# Altium footprint library Module-RF.PcbLib: 19 footprints (part 1 of 2)
Each footprint in its own frame and in the unit in brackets; x right, y up, seen from the top. Pads: shape width x height; smd on the part's side, far side on the other; paste and mask are expansions set on the pad; w line width, h text height; cw(c..) or ccw(c..) is an arc to the next point about the centre after c.
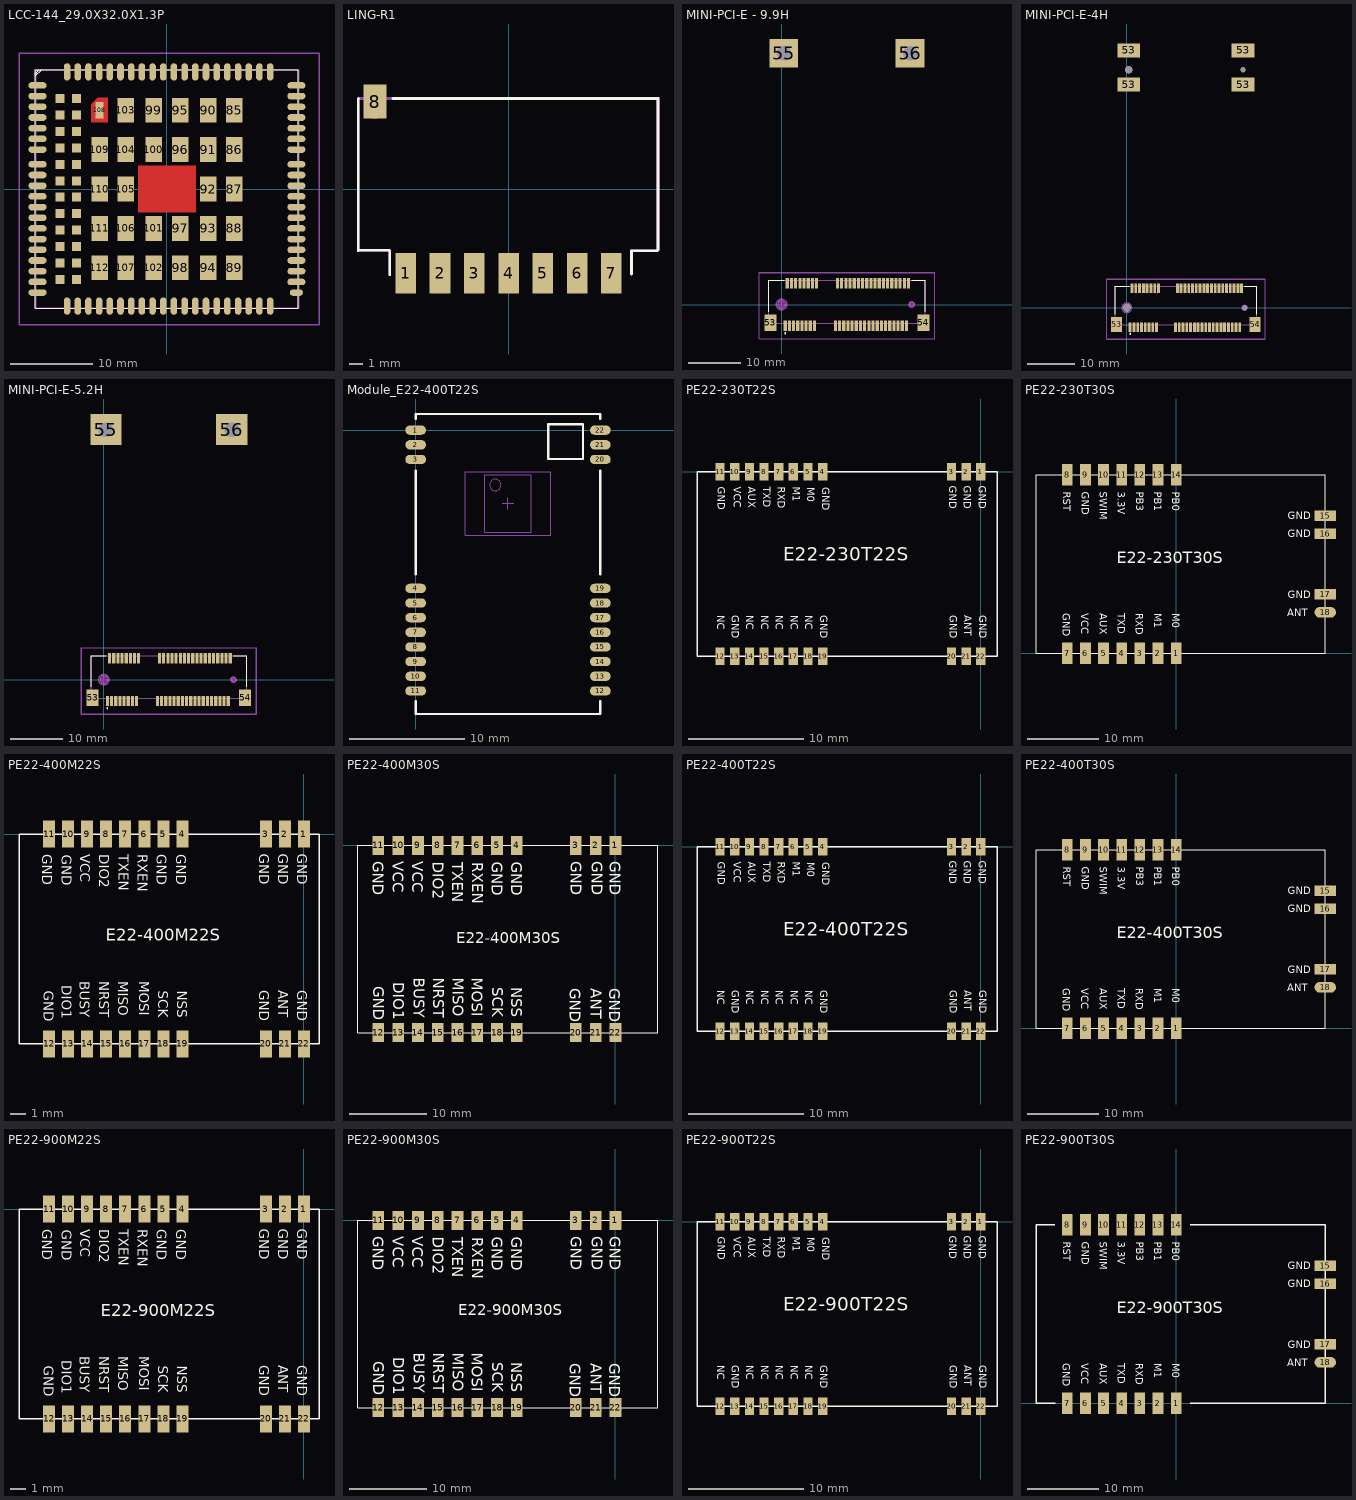
[diagram p0: the footprints below, top view; thin cyan lines are the x and y axes]

## LCC-144_29.0X32.0X1.3P [mm] "EC20 4G模块邮票孔封装"
pads (132):
  oval 2.2x0.8 smd mask+0.05: 1(-15.75,12.6) 2(-15.75,11.3) 3(-15.75,10) 4(-15.75,8.7) 5(-15.75,7.4) 6(-15.75,6.1) 7(-15.75,4.8) 8(-15.75,0.4) 9(-15.75,-0.9) 10(-15.75,-2.2) 11(-15.75,-3.5) 12(-15.75,-4.8) 13(-15.75,-6.1) 14(-15.75,-7.4) 15(-15.75,-8.7) 16(-15.75,-10) 17(-15.75,-11.3) 18(-15.75,-12.6) 38(15.75,-11.3) 39(15.75,-10) 40(15.75,-8.7) 41(15.75,-7.4) 42(15.75,-6.1) 43(15.75,-4.8) 44(15.75,-3.5) 45(15.75,-2.2) 46(15.75,-0.9) 47(15.75,0.4) 48(15.75,4.8) 49(15.75,6.1) 50(15.75,7.4) 51(15.75,8.7) 52(15.75,10) 53(15.75,11.3) 54(15.75,12.6) 141(-15.75,3) 142(-15.75,1.7) 143(15.75,1.7) 144(15.75,3)
  oval 0.8x2.1 smd mask+0.05: 19(-9.55,-14.25) 20(-8.25,-14.25) 21(-6.95,-14.25) 22(-5.65,-14.25) 23(-4.35,-14.25) 24(-3.05,-14.25) 25(-1.75,-14.25) 26(-0.45,-14.25) 27(0.85,-14.25) 28(2.15,-14.25) 29(3.45,-14.25) 30(4.75,-14.25) 31(6.05,-14.25) 32(7.35,-14.25) 33(8.65,-14.25) 34(9.95,-14.25) 35(11.25,-14.25) 36(12.55,-14.25) 55(12.55,14.25) 56(11.25,14.25) 57(9.95,14.25) 58(8.65,14.25) 59(7.35,14.25) 60(6.05,14.25) 61(4.75,14.25) 62(3.45,14.25) 63(2.15,14.25) 64(0.85,14.25) 65(-0.45,14.25) 66(-1.75,14.25) 67(-3.05,14.25) 68(-4.35,14.25) 69(-5.65,14.25) 70(-6.95,14.25) 71(-8.25,14.25) 72(-9.55,14.25) 113(-10.85,14.25) 114(-12.15,14.25) 115(-10.85,-14.25) 116(-12.15,-14.25)
  oval 1.6x0.8 smd mask+0.05: 37(15.75,-12.6)
  rect 2x3 smd mask+0.05: 85(8.2,9.6) 86(8.2,4.8) 87(8.2,0) 88(8.2,-4.8) 89(8.2,-9.6) 90(5,9.6) 91(5,4.8) 92(5,0) 93(5,-4.8) 94(5,-9.6) 95(1.6,9.6) 96(1.6,4.8) 97(1.6,-4.8) 98(1.6,-9.6) 99(-1.6,9.6) 100(-1.6,4.8) 101(-1.6,-4.8) 102(-1.6,-9.6) 103(-5,9.6) 104(-5,4.8) 105(-5,0) 106(-5,-4.8) 107(-5,-9.6) 109(-8.2,4.8) 110(-8.2,0) 111(-8.2,-4.8) 112(-8.2,-9.6)
  rect 1x2 smd: 108(-8.2,9.6)
  rect 1.1x1.1 smd mask+0.05: 117(-11,11) 118(-11,9) 119(-11,7) 120(-11,5) 121(-11,3) 122(-11,1) 123(-11,-1) 124(-11,-3) 125(-11,-5) 126(-11,-7) 127(-11,-9) 128(-11,-11) 129(-13,11) 130(-13,9) 131(-13,7) 132(-13,5) 133(-13,3) 134(-13,1) 135(-13,-1) 136(-13,-3) 137(-13,-5) 138(-13,-7) 139(-13,-9) 140(-13,-11)
Top Layer:
  pour cut-out: 3.5,2.8 -3.5,2.8 -3.5,-2.8 3.5,-2.8
  region: -9.2,10.3 -8.4,11.1 -7.2,11.1 -7.2,8.1 -9.2,8.1
Top Overlay:
  lines w0.102: -16,13.75 -15.25,14.5 ; -16,14.5 -16,14.05 -15.55,14.5 -16,14.5 ; -16,14.5 -16,-14.5 16,-14.5 16,14.5 -16,14.5
Top Paste:
  region: -9.2,10.3 -8.4,11.1 -7.2,11.1 -7.2,8.1 -9.2,8.1
Top Solder:
  region: -9.25,8.05 -7.15,8.05 -7.15,11.15 -8.45,11.15 -9.25,10.35
Top Component Outline:
  lines w0.2: -16,-14.5 -16,14.5 16,14.5 16,-14.5 -16,-14.5
Top Value:
  text "'.Comment'" at -5.266,-1.08 h4
Top Designator:
  text "'.Designator'" at -11.5,-1.5 h4
Top Courtyard:
  lines w0.152: -18,-16.5 18.5,-16.5 18.5,16.5 -18,16.5 -18,-16.5
  lines w0.2: -1.5,0 1.5,0 ; 0,-1.5 0,1.5
Top Assembly (Mech20):
  lines w0.2: -16,-14.5 -16,14.5 16,14.5 16,-14.5 -16,-14.5
3D body "EC20_R2.1_assy_3D_20171216.stp": height 2.4, standoff 0, extent -16,-14.5 16,14.5

## LING-R1 [mm] "蜂鸟无线模块 灵-R1"
pads (8):
  rect 1.524x3 smd paste+0 mask+0.051: 1(-7.62,-6.225) 2(-5.08,-6.225) 3(-2.54,-6.225) 4(0,-6.225) 5(2.54,-6.225) 6(5.08,-6.225) 7(7.62,-6.225)
  rect 1.7x2.5 smd paste+0 mask+0.051: 8(-9.906,6.475)
Top Layer:
  lines w0.254: -10.369,5.779 cw(c-9.919,5.779) -9.469,5.779 ; -10.369,5.779 ccw(c-9.919,5.779) -9.469,5.779 ; -10.369,5.779 cw(c-9.919,5.779) -9.469,5.779 ; -10.369,5.779 ccw(c-9.919,5.779) -9.469,5.779 ; -10.396,5.779 cw(c-9.919,5.779) -9.442,5.779 cw(c-9.919,5.779) -10.396,5.779
Top Overlay:
  lines w0.2: -11.112,6.699 -11.132,6.68 -11.132,-4.559 -11.112,-4.54 -8.844,-4.54 -8.8,-4.585 -8.8,-6.338 ; -8.559,6.699 11.049,6.699 11.068,6.718 11.068,-4.521 11.005,-4.585 9.1,-4.585 9.1,-6.3
Top Value:
  text "'.Comment'" at -5.8,-0.581 h2.54
Top Designator:
  text "'.Designator'" at -7.1,-0.456 h2.54
Top Assembly (Mech20):
  lines w0.2: -8.8,-6.338 -8.8,-4.585 -8.844,-4.54 -11.112,-4.54 -11.132,-4.559 -11.132,6.68 -11.112,6.699 11.049,6.699 11.068,6.718 11.068,-4.521 11.005,-4.585 9.1,-4.585 9.1,-6.3

## MINI-PCI-E - 9.9H [mm] "MINI PCI-e 52P贴片插座，间距0.8mm 高度9mm"
pads (56):
  rect 0.6x2 smd: 1(0.7,-4.1) 2(1.1,4.1) 3(1.5,-4.1) 4(1.9,4.1) 5(2.3,-4.1) 6(2.7,4.1) 7(3.1,-4.1) 8(3.5,4.1) 9(3.9,-4.1) 10(4.3,4.1) 11(4.7,-4.1) 12(5.1,4.1) 13(5.5,-4.1) 14(5.9,4.1) 15(6.3,-4.1) 16(6.7,4.1) 17(10.3,-4.1) 18(10.7,4.1) 19(11.1,-4.1) 20(11.5,4.1) 21(11.9,-4.1) 22(12.3,4.1) 23(12.7,-4.1) 24(13.1,4.1) 25(13.5,-4.1) 26(13.9,4.1) 27(14.3,-4.1) 28(14.7,4.1) 29(15.1,-4.1) 30(15.5,4.1) 31(15.9,-4.1) 32(16.3,4.1) 33(16.7,-4.1) 34(17.1,4.1) 35(17.5,-4.1) 36(17.9,4.1) 37(18.3,-4.1) 38(18.7,4.1) 39(19.1,-4.1) 40(19.5,4.1) 41(19.9,-4.1) 42(20.3,4.1) 43(20.7,-4.1) 44(21.1,4.1) 45(21.5,-4.1) 46(21.9,4.1) 47(22.3,-4.1) 48(22.7,4.1) 49(23.1,-4.1) 50(23.5,4.1) 51(23.9,-4.1) 52(24.3,4.1)
  rect 2.3x3.2 smd: 53(-2.15,-3.5) 54(27.15,-3.5)
  rect 5.5x5.5 hole 2.8: 55(0.4,48.05) 56(24.6,48.05)
Top Overlay:
  lines w0.1: -2.45,-1.4 -2.45,4.6 0.5,4.6 ; 24.9,4.6 27.45,4.6 27.45,-1.4
  lines w0.2: 0.6,-5.5 cw(c0.7,-5.5) 0.8,-5.5 cw(c0.7,-5.5) 0.6,-5.5
Keep-Out Layer:
  board cut-out: 24.55,0 24.55,-0.09 24.619,-0.255 24.745,-0.381 24.91,-0.45 25,-0.45 25.09,-0.45 25.255,-0.381 25.381,-0.255 25.45,-0.09 25.45,0 25.45,0.09 25.381,0.255 25.255,0.381 25.09,0.45 25,0.45 24.91,0.45 24.745,0.381 24.619,0.255 24.55,0.09
  board cut-out: 0,-0.7 -0.069,-0.7 -0.204,-0.673 -0.332,-0.62 -0.446,-0.544 -0.544,-0.446 -0.62,-0.332 -0.673,-0.204 -0.7,-0.069 -0.7,0 -0.7,0.069 -0.673,0.204 -0.62,0.332 -0.544,0.446 -0.446,0.544 -0.332,0.62 -0.204,0.673 -0.069,0.7 0,0.7 0.069,0.7 0.204,0.673 0.332,0.62 0.446,0.544 0.544,0.446 0.62,0.332 0.673,0.204 0.7,0.069 0.7,0 0.7,-0.069 0.673,-0.204 0.62,-0.332 0.544,-0.446 0.446,-0.544 0.332,-0.62 0.204,-0.673 0.069,-0.7
Board Outline:
  circle w0.1: c25,0 r0.45
  circle w0.1: c0,0 r0.7
Body Extra:
  lines w0.2: -2.45,-3.6 27.45,-3.6 27.45,4.6 -2.45,4.6 -2.45,-3.6
Bottom Courtyard:
  lines w0.1: -4.3,-6.6 29.3,-6.6 29.3,6.1 -4.3,6.1 -4.3,-6.6
Mechanical 29:
  circle w0.3: c24.892,0 r0.5
  circle w0.3: c0,0 r1
  lines w0.1: -4.25,-6.525 -4.25,6.175 29.35,6.175 29.35,-6.525 -4.25,-6.525
  text "'.Designator'" at 6.604,-0.508 h1.02
3D body "mini PEI-E 9.9h.stp": height 9.92, standoff -0.63, extent -2.5,-4.55 27.5,4.67

## MINI-PCI-E-4H [mm] "MINI PCI-e 52P贴片插座"
pads (62):
  rect 0.6x2 smd: 1(0.7,-4.1) 2(1.1,4.1) 3(1.5,-4.1) 4(1.9,4.1) 5(2.3,-4.1) 6(2.7,4.1) 7(3.1,-4.1) 8(3.5,4.1) 9(3.9,-4.1) 10(4.3,4.1) 11(4.7,-4.1) 12(5.1,4.1) 13(5.5,-4.1) 14(5.9,4.1) 15(6.3,-4.1) 16(6.7,4.1) 17(10.3,-4.1) 18(10.7,4.1) 19(11.1,-4.1) 20(11.5,4.1) 21(11.9,-4.1) 22(12.3,4.1) 23(12.7,-4.1) 24(13.1,4.1) 25(13.5,-4.1) 26(13.9,4.1) 27(14.3,-4.1) 28(14.7,4.1) 29(15.1,-4.1) 30(15.5,4.1) 31(15.9,-4.1) 32(16.3,4.1) 33(16.7,-4.1) 34(17.1,4.1) 35(17.5,-4.1) 36(17.9,4.1) 37(18.3,-4.1) 38(18.7,4.1) 39(19.1,-4.1) 40(19.5,4.1) 41(19.9,-4.1) 42(20.3,4.1) 43(20.7,-4.1) 44(21.1,4.1) 45(21.5,-4.1) 46(21.9,4.1) 47(22.3,-4.1) 48(22.7,4.1) 49(23.1,-4.1) 50(23.5,4.1) 51(23.9,-4.1) 52(24.3,4.1)
  rect 2.3x3.2 smd: 53(-2.15,-3.5) 54(27.15,-3.5)
  rect 4.8x3 smd: 53(0.4,47.25) 53(0.4,54.5) 53(24.6,47.25) 53(24.6,54.5)
  round 1.524 hole 1.6: 55(0,0) 55(0.4,50.4)
  round 1 hole 1.1: 56(24.6,50.4) 56(25,0)
Top Overlay:
  lines w0.1: -2.45,-1.4 -2.45,4.6 0.5,4.6 ; 24.9,4.6 27.45,4.6 27.45,-1.4
  lines w0.2: 0.6,-5.5 ccw(c0.7,-5.5) 0.8,-5.5 ccw(c0.7,-5.5) 0.6,-5.5
Keep-Out Layer:
  board cut-out: 0,-0.7 -0.069,-0.7 -0.204,-0.673 -0.332,-0.62 -0.446,-0.544 -0.544,-0.446 -0.62,-0.332 -0.673,-0.204 -0.7,-0.069 -0.7,0 -0.7,0.069 -0.673,0.204 -0.62,0.332 -0.544,0.446 -0.446,0.544 -0.332,0.62 -0.204,0.673 -0.069,0.7 0,0.7 0.069,0.7 0.204,0.673 0.332,0.62 0.446,0.544 0.544,0.446 0.62,0.332 0.673,0.204 0.7,0.069 0.7,0 0.7,-0.069 0.673,-0.204 0.62,-0.332 0.544,-0.446 0.446,-0.544 0.332,-0.62 0.204,-0.673 0.069,-0.7
Board Outline:
  circle w0.1: c0,0 r0.7
Body Extra:
  lines w0.2: -2.45,-3.6 -2.45,4.6 27.45,4.6 27.45,-3.6 -2.45,-3.6
Bottom Courtyard:
  lines w0.1: -4.3,-6.6 -4.3,6.1 29.3,6.1 29.3,-6.6 -4.3,-6.6
Mechanical 29:
  circle w0.3: c0,0 r1
  circle w0.3: c24.892,0 r0.5
  lines w0.1: -4.25,-6.525 29.35,-6.525 29.35,6.175 -4.25,6.175 -4.25,-6.525
  text "'.Designator'" at 6.604,-0.508 h1.02
3D body "mini PIC-E 4H type I GF.stp": height 4, standoff -0.65, extent -2.45,-4.555 27.45,4.535
3D body "EC20 Minipcie_3DFile_20170727.stp": height 5.05, standoff 0.1, extent -2.5,0 27.5,50.95
3D body "mini-pci-e-latch.stp": height 4.85, standoff -0.7, extent -1.725,46.14 26.725,55.5

## MINI-PCI-E-5.2H [mm] "MINI PCI-e 52P贴片插座，间距0.8mm 高度9mm"
pads (56):
  rect 0.6x2 smd: 1(0.7,-4.1) 2(1.1,4.1) 3(1.5,-4.1) 4(1.9,4.1) 5(2.3,-4.1) 6(2.7,4.1) 7(3.1,-4.1) 8(3.5,4.1) 9(3.9,-4.1) 10(4.3,4.1) 11(4.7,-4.1) 12(5.1,4.1) 13(5.5,-4.1) 14(5.9,4.1) 15(6.3,-4.1) 16(6.7,4.1) 17(10.3,-4.1) 18(10.7,4.1) 19(11.1,-4.1) 20(11.5,4.1) 21(11.9,-4.1) 22(12.3,4.1) 23(12.7,-4.1) 24(13.1,4.1) 25(13.5,-4.1) 26(13.9,4.1) 27(14.3,-4.1) 28(14.7,4.1) 29(15.1,-4.1) 30(15.5,4.1) 31(15.9,-4.1) 32(16.3,4.1) 33(16.7,-4.1) 34(17.1,4.1) 35(17.5,-4.1) 36(17.9,4.1) 37(18.3,-4.1) 38(18.7,4.1) 39(19.1,-4.1) 40(19.5,4.1) 41(19.9,-4.1) 42(20.3,4.1) 43(20.7,-4.1) 44(21.1,4.1) 45(21.5,-4.1) 46(21.9,4.1) 47(22.3,-4.1) 48(22.7,4.1) 49(23.1,-4.1) 50(23.5,4.1) 51(23.9,-4.1) 52(24.3,4.1)
  rect 2.3x3.2 smd: 53(-2.15,-3.5) 54(27.15,-3.5)
  rect 6x6 hole 2.8: 55(0.4,48.05) 56(24.6,48.05)
Top Overlay:
  lines w0.1: -2.45,-1.4 -2.45,4.6 0.5,4.6 ; 24.9,4.6 27.45,4.6 27.45,-1.4
  lines w0.2: 0.6,-5.5 cw(c0.7,-5.5) 0.8,-5.5 cw(c0.7,-5.5) 0.6,-5.5
Keep-Out Layer:
  board cut-out: 24.55,0 24.55,-0.09 24.619,-0.255 24.745,-0.381 24.91,-0.45 25,-0.45 25.09,-0.45 25.255,-0.381 25.381,-0.255 25.45,-0.09 25.45,0 25.45,0.09 25.381,0.255 25.255,0.381 25.09,0.45 25,0.45 24.91,0.45 24.745,0.381 24.619,0.255 24.55,0.09
  board cut-out: 0,-0.7 -0.069,-0.7 -0.204,-0.673 -0.332,-0.62 -0.446,-0.544 -0.544,-0.446 -0.62,-0.332 -0.673,-0.204 -0.7,-0.069 -0.7,0 -0.7,0.069 -0.673,0.204 -0.62,0.332 -0.544,0.446 -0.446,0.544 -0.332,0.62 -0.204,0.673 -0.069,0.7 0,0.7 0.069,0.7 0.204,0.673 0.332,0.62 0.446,0.544 0.544,0.446 0.62,0.332 0.673,0.204 0.7,0.069 0.7,0 0.7,-0.069 0.673,-0.204 0.62,-0.332 0.544,-0.446 0.446,-0.544 0.332,-0.62 0.204,-0.673 0.069,-0.7
Board Outline:
  circle w0.1: c25,0 r0.45
  circle w0.1: c0,0 r0.7
Body Extra:
  lines w0.2: -2.45,-3.6 27.45,-3.6 27.45,4.6 -2.45,4.6 -2.45,-3.6
Bottom Courtyard:
  lines w0.1: -4.3,-6.6 29.3,-6.6 29.3,6.1 -4.3,6.1 -4.3,-6.6
Mechanical 29:
  circle w0.3: c24.892,0 r0.5
  circle w0.3: c0,0 r1
  lines w0.1: -4.25,-6.525 -4.25,6.175 29.35,6.175 29.35,-6.525 -4.25,-6.525
  text "'.Designator'" at 6.604,-0.508 h1.02
3D body "mini PCI-E 5.6H.stp": height 5.77, standoff -0.48, extent -2.45,-4.555 27.45,4.525

## Module_E22-400T22S [mm]
height 1.7
pads (22):
  oval 1.8x0.8 smd: 1(0,0) 2(0,-1.27) 3(0,-2.54) 4(0,-13.71) 5(0,-14.98) 6(0,-16.25) 7(0,-17.52) 8(0,-18.79) 9(0,-20.06) 10(0,-21.33) 11(0,-22.6) 12(16,-22.6) 13(16,-21.33) 14(16,-20.06) 15(16,-18.79) 16(16,-17.52) 17(16,-16.25) 18(16,-14.98) 19(16,-13.71) 20(16,-2.54) 21(16,-1.27) 22(16,0)
Top Overlay:
  lines w0.2: 0,-23.5 0,-24.6 16,-24.6 16,-23.5 ; 0,-12.5 0,-3.5 ; 0,1 0,1.4 16,1.4 16,1 ; 16,-12.5 16,-3.5 ; 11.5,-2.5 14.5,-2.5 14.5,0.5 11.5,0.5 11.5,-2.5
Top Courtyard:
  lines w0.05: 4.3,-9.1 11.7,-9.1 11.7,-3.6 4.3,-3.6 4.3,-9.1
  lines w0.1: 7.5,-6.35 8.5,-6.35 ; 8,-6.85 8,-5.85
Top Assembly (Mech20):
  circle w0.1: c6.9,-4.75 r0.5
  lines w0.1: 6,-8.85 10,-8.85 10,-3.85 6,-3.85 6,-8.85
3D body "User Library-E18-MS1PA1-IPX.STEP": height 2.4, standoff -0.01, extent -0.11,-22.81 16.11,-0.2

## PE22-230T22S [mm] "26mm**16mm*3.23mm-S"
pads (22):
  rect 0.8x1.5 smd: 1(0,0) 2(-1.27,0) 3(-2.54,0) 4(-13.71,0) 5(-14.98,0) 6(-16.25,0) 7(-17.52,0) 8(-18.79,0) 9(-20.06,0) 10(-21.33,0) 11(-22.6,0) 12(-22.6,-16) 13(-21.33,-16) 14(-20.06,-16) 15(-18.79,-16) 16(-17.52,-16) 17(-16.25,-16) 18(-14.98,-16) 19(-13.71,-16) 20(-2.54,-16) 21(-1.27,-16) 22(0,-16)
Top Overlay:
  lines w0.127: -24.6,-16 -24.6,0 1.4,0 1.4,-16 -24.6,-16
  text "GND" at -0.408,-1.224 h1.1
  text "E22-230T22S" at -17.107,-8.126 h2
  text "M0" at -15.257,-1.351 h1.1
  text "M1" at -16.536,-1.301 h1.1
  text "RXD" at -17.814,-1.301 h1.1
  text "TXD" at -19.093,-1.301 h1.1
  text "AUX" at -20.372,-1.301 h1.1
  text "VCC" at -21.651,-1.301 h1.1
  text "GND" at -23.01,-1.301 h1.1
  text "GND" at -13.97,-1.351 h1.1
  text "NC" at -23.06,-12.441 h1.1
  text "GND" at -21.811,-12.441 h1.1
  text "NC" at -20.532,-12.441 h1.1
  text "NC" at -19.253,-12.441 h1.1
  text "NC" at -17.974,-12.441 h1.1
  text "NC" at -16.696,-12.441 h1.1
  text "NC" at -15.417,-12.441 h1.1
  text "GND" at -14.138,-12.441 h1.1
  text "GND" at -0.358,-12.441 h1.1
  text "ANT" at -1.637,-12.441 h1.1
  text "GND" at -2.916,-12.441 h1.1
  text "GND" at -2.966,-1.224 h1.1
  text "GND" at -1.687,-1.224 h1.1
3D body "E18-MS1PA1-PCB.step": height 2.71, standoff -0.01, extent -25.004,-16 2.004,0.009

## PE22-230T30S [mm] "40.5mm*25mm*3.80mm-S"
pads (18):
  rect 1.5x3 smd: 1(0,0) 2(-2.54,0) 3(-5.08,0) 4(-7.62,0) 5(-10.16,0) 6(-12.7,0) 7(-15.24,0) 8(-15.24,25) 9(-12.7,25) 10(-10.16,25) 11(-7.62,25) 12(-5.08,25) 13(-2.54,25) 14(0,25)
  rect 3x1.5 smd: 15(20.88,19.27) 16(20.88,16.73) 17(20.88,8.27)
  oval 3x1.5 smd: 18(20.88,5.73)
Top Overlay:
  lines w0.127: -19.62,0 -19.62,25 20.88,25 20.88,0 -19.62,0
  text "E22-230T30S" at -8.317,12.065 h2.8
  text "GND" at 15.602,7.72 h1
  text "ANT" at 15.554,5.17 h1
  text "M0" at -0.577,5.575 h1
  text "M1" at -3.087,5.575 h1
  text "RXD" at -5.637,5.575 h1
  text "TXD" at -8.167,5.575 h1
  text "AUX" at -10.707,5.575 h1
  text "VCC" at -13.257,5.575 h1
  text "GND" at -15.847,5.575 h1
  text "RST" at -15.827,22.592 h1
  text "GND" at -13.237,22.592 h1
  text "3.3V" at -8.147,22.592 h1
  text "PB3" at -5.617,22.592 h1
  text "PB1" at -3.067,22.592 h1
  text "PB0" at -0.557,22.592 h1
  text "GND" at 15.602,16.22 h1
  text "GND" at 15.602,18.73 h1
  text "SWIM" at -10.73,22.606 h1

## PE22-400M22S [mm] "20mm*14mm*2.8mm-S"
pads (22):
  rect 0.8x1.8 smd: 1(0,0) 2(-1.27,0) 3(-2.54,0) 4(-8.11,0) 5(-9.38,0) 6(-10.65,0) 7(-11.92,0) 8(-13.19,0) 9(-14.46,0) 10(-15.73,0) 11(-17,0) 12(-17,-14) 13(-15.73,-14) 14(-14.46,-14) 15(-13.19,-14) 16(-11.92,-14) 17(-10.65,-14) 18(-9.38,-14) 19(-8.11,-14) 20(-2.54,-14) 21(-1.27,-14) 22(0,-14)
Top Overlay:
  lines w0.1: -19,-14 1,-14 1,0 -19,0 -19,-14
  text "E22-400M22S" at -13.208,-7.112 h0.8
  text "NSS" at -8.459,-10.444 h0.65
  text "SCK" at -9.729,-10.444 h0.65
  text "MOSI" at -10.999,-9.809 h0.65
  text "MISO" at -12.396,-9.809 h0.65
  text "NRST" at -13.666,-9.809 h0.65
  text "BUSY" at -14.936,-9.809 h0.65
  text "DIO1" at -16.14,-10.097 h0.65
  text "GND" at -17.349,-10.444 h0.65
  text "GND" at -2.996,-10.428 h0.65
  text "ANT" at -1.717,-10.428 h0.65
  text "GND" at -0.438,-10.428 h0.65
  text "GND" at -0.438,-1.323 h0.65
  text "GND" at -1.717,-1.323 h0.65
  text "GND" at -2.996,-1.323 h0.65
  text "GND" at -17.45,-1.353 h0.65
  text "GND" at -16.14,-1.373 h0.65
  text "VCC" at -14.922,-1.353 h0.65
  text "DIO2" at -13.643,-1.353 h0.65
  text "TXEN" at -12.364,-1.353 h0.65
  text "RXEN" at -11.086,-1.353 h0.65
  text "GND" at -9.807,-1.353 h0.65
  text "GND" at -8.528,-1.353 h0.65

## PE22-400M30S [mm] "38.5mm*24mm*3.8mm-S"
pads (22):
  rect 1.5x2.5 smd: 1(0,0) 2(-2.54,0) 3(-5.08,0) 4(-12.65,0) 5(-15.19,0) 6(-17.73,0) 7(-20.27,0) 8(-22.81,0) 9(-25.35,0) 10(-27.89,0) 11(-30.43,0) 12(-30.43,-24) 13(-27.89,-24) 14(-25.35,-24) 15(-22.81,-24) 16(-20.27,-24) 17(-17.73,-24) 18(-15.19,-24) 19(-12.65,-24) 20(-5.08,-24) 21(-2.54,-24) 22(0,-24)
Top Overlay:
  lines w0.1: -33.04,-24 -33.04,0 5.46,0 5.46,-24 -33.04,-24
  text "NSS" at -13.351,-18.17 h1.4
  text "SCK" at -15.816,-18.17 h1.4
  text "MOSI" at -18.416,-16.979 h1.4
  text "MISO" at -20.881,-16.979 h1.4
  text "NRST" at -23.406,-16.979 h1.4
  text "BUSY" at -25.871,-16.979 h1.4
  text "DIO1" at -28.532,-17.552 h1.4
  text "GND" at -31.079,-18.064 h1.4
  text "GND" at -5.844,-18.291 h1.4
  text "ANT" at -3.202,-18.291 h1.4
  text "GND" at -0.775,-18.291 h1.4
  text "GND" at -0.748,-1.991 h1.4
  text "GND" at -3.07,-1.991 h1.4
  text "GND" at -5.743,-1.991 h1.4
  text "GND" at -31.143,-2.051 h1.4
  text "VCC" at -28.61,-2.051 h1.4
  text "VCC" at -26.076,-2.051 h1.4
  text "DIO2" at -23.438,-2.117 h1.4
  text "TXEN" at -20.935,-2.169 h1.4
  text "RXEN" at -18.402,-2.169 h1.4
  text "GND" at -15.899,-2.096 h1.4
  text "GND" at -13.366,-2.096 h1.4
  text "E22-400M30S" at -20.447,-12.573 h1.4

## PE22-400T22S [mm] "26mm**16mm*3.23mm-S"
pads (22):
  rect 0.8x1.5 smd: 1(0,0) 2(-1.27,0) 3(-2.54,0) 4(-13.71,0) 5(-14.98,0) 6(-16.25,0) 7(-17.52,0) 8(-18.79,0) 9(-20.06,0) 10(-21.33,0) 11(-22.6,0) 12(-22.6,-16) 13(-21.33,-16) 14(-20.06,-16) 15(-18.79,-16) 16(-17.52,-16) 17(-16.25,-16) 18(-14.98,-16) 19(-13.71,-16) 20(-2.54,-16) 21(-1.27,-16) 22(0,-16)
Top Overlay:
  lines w0.127: -24.6,-16 1.4,-16 1.4,0 -24.6,0 -24.6,-16
  text "GND" at -1.687,-1.224 h1.1
  text "GND" at -2.966,-1.224 h1.1
  text "GND" at -2.916,-12.441 h1.1
  text "ANT" at -1.637,-12.441 h1.1
  text "GND" at -0.358,-12.441 h1.1
  text "GND" at -14.138,-12.441 h1.1
  text "NC" at -15.417,-12.441 h1.1
  text "NC" at -16.696,-12.441 h1.1
  text "NC" at -17.974,-12.441 h1.1
  text "NC" at -19.253,-12.441 h1.1
  text "NC" at -20.532,-12.441 h1.1
  text "GND" at -21.811,-12.441 h1.1
  text "NC" at -23.06,-12.441 h1.1
  text "GND" at -13.97,-1.351 h1.1
  text "GND" at -23.01,-1.301 h1.1
  text "VCC" at -21.651,-1.301 h1.1
  text "AUX" at -20.372,-1.301 h1.1
  text "TXD" at -19.093,-1.301 h1.1
  text "RXD" at -17.814,-1.301 h1.1
  text "M1" at -16.536,-1.301 h1.1
  text "M0" at -15.257,-1.351 h1.1
  text "E22-400T22S" at -17.107,-8.126 h2
  text "GND" at -0.408,-1.224 h1.1
3D body "E18-MS1PA1-PCB.step": height 2.71, standoff -0.01, extent -25.009,-16 2,0.009

## PE22-400T30S [mm] "40.5mm*25mm*3.80mm-S"
pads (18):
  rect 1.5x3 smd: 1(0,0) 2(-2.54,0) 3(-5.08,0) 4(-7.62,0) 5(-10.16,0) 6(-12.7,0) 7(-15.24,0) 8(-15.24,25) 9(-12.7,25) 10(-10.16,25) 11(-7.62,25) 12(-5.08,25) 13(-2.54,25) 14(0,25)
  rect 3x1.5 smd: 15(20.88,19.27) 16(20.88,16.73) 17(20.88,8.27)
  oval 3x1.5 smd: 18(20.88,5.73)
Top Overlay:
  lines w0.127: -19.62,0 20.88,0 20.88,25 -19.62,25 -19.62,0
  text "SWIM" at -10.73,22.606 h1
  text "GND" at 15.602,18.73 h1
  text "GND" at 15.602,16.22 h1
  text "PB0" at -0.557,22.592 h1
  text "PB1" at -3.067,22.592 h1
  text "PB3" at -5.617,22.592 h1
  text "3.3V" at -8.147,22.592 h1
  text "GND" at -13.237,22.592 h1
  text "RST" at -15.827,22.592 h1
  text "GND" at -15.847,5.575 h1
  text "VCC" at -13.257,5.575 h1
  text "AUX" at -10.707,5.575 h1
  text "TXD" at -8.167,5.575 h1
  text "RXD" at -5.637,5.575 h1
  text "M1" at -3.087,5.575 h1
  text "M0" at -0.577,5.575 h1
  text "ANT" at 15.554,5.17 h1
  text "GND" at 15.602,7.72 h1
  text "E22-400T30S" at -8.317,12.065 h2.8

## PE22-900M22S [mm] "20mm*14mm*2.8mm-S"
pads (22):
  rect 0.8x1.8 smd: 1(0,0) 2(-1.27,0) 3(-2.54,0) 4(-8.11,0) 5(-9.38,0) 6(-10.65,0) 7(-11.92,0) 8(-13.19,0) 9(-14.46,0) 10(-15.73,0) 11(-17,0) 12(-17,-14) 13(-15.73,-14) 14(-14.46,-14) 15(-13.19,-14) 16(-11.92,-14) 17(-10.65,-14) 18(-9.38,-14) 19(-8.11,-14) 20(-2.54,-14) 21(-1.27,-14) 22(0,-14)
Top Overlay:
  lines w0.1: -19,-14 1,-14 1,0 -19,0 -19,-14
  text "E22-900M22S" at -13.539,-7.142 h0.8
  text "NSS" at -8.459,-10.444 h0.65
  text "SCK" at -9.729,-10.444 h0.65
  text "MOSI" at -10.999,-9.809 h0.65
  text "MISO" at -12.396,-9.809 h0.65
  text "NRST" at -13.666,-9.809 h0.65
  text "BUSY" at -14.936,-9.809 h0.65
  text "DIO1" at -16.14,-10.097 h0.65
  text "GND" at -17.349,-10.444 h0.65
  text "GND" at -2.996,-10.428 h0.65
  text "ANT" at -1.717,-10.428 h0.65
  text "GND" at -0.438,-10.428 h0.65
  text "GND" at -0.438,-1.323 h0.65
  text "GND" at -1.717,-1.323 h0.65
  text "GND" at -2.996,-1.323 h0.65
  text "GND" at -17.45,-1.353 h0.65
  text "GND" at -16.14,-1.373 h0.65
  text "VCC" at -14.922,-1.353 h0.65
  text "DIO2" at -13.643,-1.353 h0.65
  text "TXEN" at -12.364,-1.353 h0.65
  text "RXEN" at -11.086,-1.353 h0.65
  text "GND" at -9.807,-1.353 h0.65
  text "GND" at -8.528,-1.353 h0.65

## PE22-900M30S [mm] "38.5mm*24mm*3.8mm-S"
pads (22):
  rect 1.5x2.5 smd: 1(0,0) 2(-2.54,0) 3(-5.08,0) 4(-12.65,0) 5(-15.19,0) 6(-17.73,0) 7(-20.27,0) 8(-22.81,0) 9(-25.35,0) 10(-27.89,0) 11(-30.43,0) 12(-30.43,-24) 13(-27.89,-24) 14(-25.35,-24) 15(-22.81,-24) 16(-20.27,-24) 17(-17.73,-24) 18(-15.19,-24) 19(-12.65,-24) 20(-5.08,-24) 21(-2.54,-24) 22(0,-24)
Top Overlay:
  lines w0.1: -33.04,-24 5.46,-24 5.46,0 -33.04,0 -33.04,-24
  text "E22-900M30S" at -20.193,-12.192 h1.4
  text "GND" at -13.366,-2.096 h1.4
  text "GND" at -15.899,-2.096 h1.4
  text "RXEN" at -18.402,-2.169 h1.4
  text "TXEN" at -20.935,-2.169 h1.4
  text "DIO2" at -23.438,-2.117 h1.4
  text "VCC" at -26.076,-2.051 h1.4
  text "VCC" at -28.61,-2.051 h1.4
  text "GND" at -31.143,-2.051 h1.4
  text "GND" at -5.743,-1.991 h1.4
  text "GND" at -3.07,-1.991 h1.4
  text "GND" at -0.748,-1.991 h1.4
  text "GND" at -0.775,-18.291 h1.4
  text "ANT" at -3.202,-18.291 h1.4
  text "GND" at -5.844,-18.291 h1.4
  text "GND" at -31.079,-18.064 h1.4
  text "DIO1" at -28.532,-17.552 h1.4
  text "BUSY" at -25.871,-16.979 h1.4
  text "NRST" at -23.406,-16.979 h1.4
  text "MISO" at -20.881,-16.979 h1.4
  text "MOSI" at -18.416,-16.979 h1.4
  text "SCK" at -15.816,-18.17 h1.4
  text "NSS" at -13.351,-18.17 h1.4

## PE22-900T22S [mm] "26mm**16mm*3.23mm-S"
pads (22):
  rect 0.8x1.5 smd: 1(0,0) 2(-1.27,0) 3(-2.54,0) 4(-13.71,0) 5(-14.98,0) 6(-16.25,0) 7(-17.52,0) 8(-18.79,0) 9(-20.06,0) 10(-21.33,0) 11(-22.6,0) 12(-22.6,-16) 13(-21.33,-16) 14(-20.06,-16) 15(-18.79,-16) 16(-17.52,-16) 17(-16.25,-16) 18(-14.98,-16) 19(-13.71,-16) 20(-2.54,-16) 21(-1.27,-16) 22(0,-16)
Top Overlay:
  lines w0.127: -24.6,-16 1.4,-16 1.4,0 -24.6,0 -24.6,-16
  text "GND" at -1.687,-1.224 h1.1
  text "GND" at -2.966,-1.224 h1.1
  text "GND" at -2.916,-12.441 h1.1
  text "ANT" at -1.637,-12.441 h1.1
  text "GND" at -0.358,-12.441 h1.1
  text "GND" at -14.138,-12.441 h1.1
  text "NC" at -15.417,-12.441 h1.1
  text "NC" at -16.696,-12.441 h1.1
  text "NC" at -17.974,-12.441 h1.1
  text "NC" at -19.253,-12.441 h1.1
  text "NC" at -20.532,-12.441 h1.1
  text "GND" at -21.811,-12.441 h1.1
  text "NC" at -23.06,-12.441 h1.1
  text "GND" at -13.97,-1.351 h1.1
  text "GND" at -23.01,-1.301 h1.1
  text "VCC" at -21.651,-1.301 h1.1
  text "AUX" at -20.372,-1.301 h1.1
  text "TXD" at -19.093,-1.301 h1.1
  text "RXD" at -17.814,-1.301 h1.1
  text "M1" at -16.536,-1.301 h1.1
  text "M0" at -15.257,-1.351 h1.1
  text "E22-900T22S" at -17.107,-8.126 h2
  text "GND" at -0.408,-1.224 h1.1

## PE22-900T30S [mm] "40.5mm*25mm*3.80mm-S"
pads (18):
  rect 1.5x3 smd: 1(0,0) 2(-2.54,0) 3(-5.08,0) 4(-7.62,0) 5(-10.16,0) 6(-12.7,0) 7(-15.24,0) 8(-15.24,25) 9(-12.7,25) 10(-10.16,25) 11(-7.62,25) 12(-5.08,25) 13(-2.54,25) 14(0,25)
  rect 3x1.5 smd: 15(20.88,19.27) 16(20.88,16.73) 17(20.88,8.27)
  oval 3x1.5 smd: 18(20.88,5.73)
Top Overlay:
  lines w0.2: -17,25 -19.62,25 -19.62,0 -16.921,0 ; 2,0 20.88,0 20.88,25 2,25
  text "E22-900T30S" at -8.317,12.065 h2.8
  text "GND" at 15.602,7.72 h1
  text "ANT" at 15.554,5.17 h1
  text "M0" at -0.577,5.575 h1
  text "M1" at -3.087,5.575 h1
  text "RXD" at -5.637,5.575 h1
  text "TXD" at -8.167,5.575 h1
  text "AUX" at -10.707,5.575 h1
  text "VCC" at -13.257,5.575 h1
  text "GND" at -15.847,5.575 h1
  text "RST" at -15.827,22.592 h1
  text "GND" at -13.237,22.592 h1
  text "3.3V" at -8.147,22.592 h1
  text "PB3" at -5.617,22.592 h1
  text "PB1" at -3.067,22.592 h1
  text "PB0" at -0.557,22.592 h1
  text "GND" at 15.602,16.22 h1
  text "GND" at 15.602,18.73 h1
  text "SWIM" at -10.73,22.606 h1